# Altium footprint library SULLINS_PPPC052LJBN-RC.PcbLib: 1 footprints
Each footprint in its own frame and in the unit in brackets; x right, y up, seen from the top. Pads: shape width x height; smd on the part's side, far side on the other; paste and mask are expansions set on the pad; w line width, h text height; cw(c..) or ccw(c..) is an arc to the next point about the centre after c.
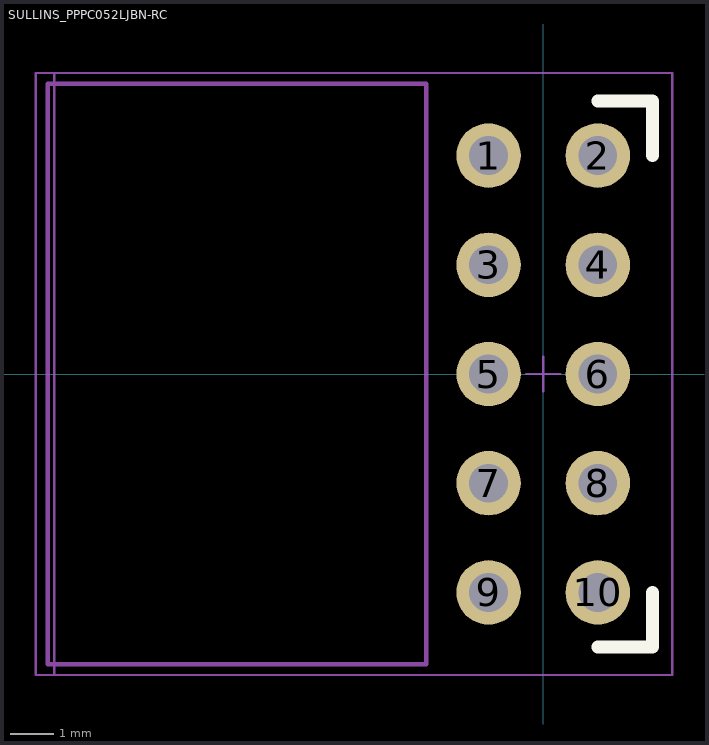
[diagram p0: the footprint, top view; thin cyan lines are the x and y axes]

## SULLINS_PPPC052LJBN-RC [mm]
height 5.38
pads (10):
  round 1.5 hole 0.9: 1(-1.27,5.08) 2(1.27,5.08) 3(-1.27,2.54) 4(1.27,2.54) 5(-1.27,0) 6(1.27,0) 7(-1.27,-2.54) 8(1.27,-2.54) 9(-1.27,-5.08) 10(1.27,-5.08)
Top Overlay:
  lines w0.3: 1.27,-6.35 2.54,-6.35 2.54,-5.08 ; 1.27,6.35 2.54,6.35 2.54,5.08
Mechanical 13:
  lines w0.1: -11.52,6.75 -11.52,-6.75 -2.72,-6.75 -2.72,6.75 -11.52,6.75 ; -11.52,6.75 -11.52,6.75
Mechanical 15:
  lines w0.05: -11.37,-7 -11.37,7 ; -0.4,0 0.4,0 ; 0,-0.4 0,0.4 ; -11.8,-7 -11.8,7 3,7 3,-7 -11.8,-7
  text "Plastic End (Nom.)" at -10.725,-3.16 h0.5
3D body "SULLINS_PPPC052LJBN-RC.STEP": height 5.08, standoff -3.15, extent -11.37,-6.6 1.47,6.6